# Altium integrated library BLM18DN601SZ1DA.IntLib: 1 symbol
Pins are listed as number, name and electrical type; pins without a type are passive.

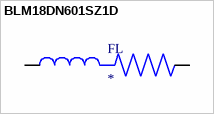
[diagram p0: symbol BLM18DN601SZ1D]

## BLM18DN601SZ1D
designator FL
600 Ohms @ 100MHz 1 Ferrite Bead 0603 _1608 Metric_ 700mA; MF: Murata; MP: BLM18DN601SZ1D; Package: 1608 Murata; Availability: Unavailable; Value: *; SnapEDA_Link: https://www.snapeda.com/parts/BLM18DN601SZ1D/Murata/view-part/4302620/?ref=snap; Price: None
footprint BEADC1608X95N
pins: 1, 2